# Altium footprint library LimeMicroAltiumLib.PcbLib: 876 footprints (part 55 of 57)
Each footprint in its own frame and in the unit in brackets; x right, y up, seen from the top. Pads: shape width x height; smd on the part's side, far side on the other; paste and mask are expansions set on the pad; w line width, h text height; cw(c..) or ccw(c..) is an arc to the next point about the centre after c.
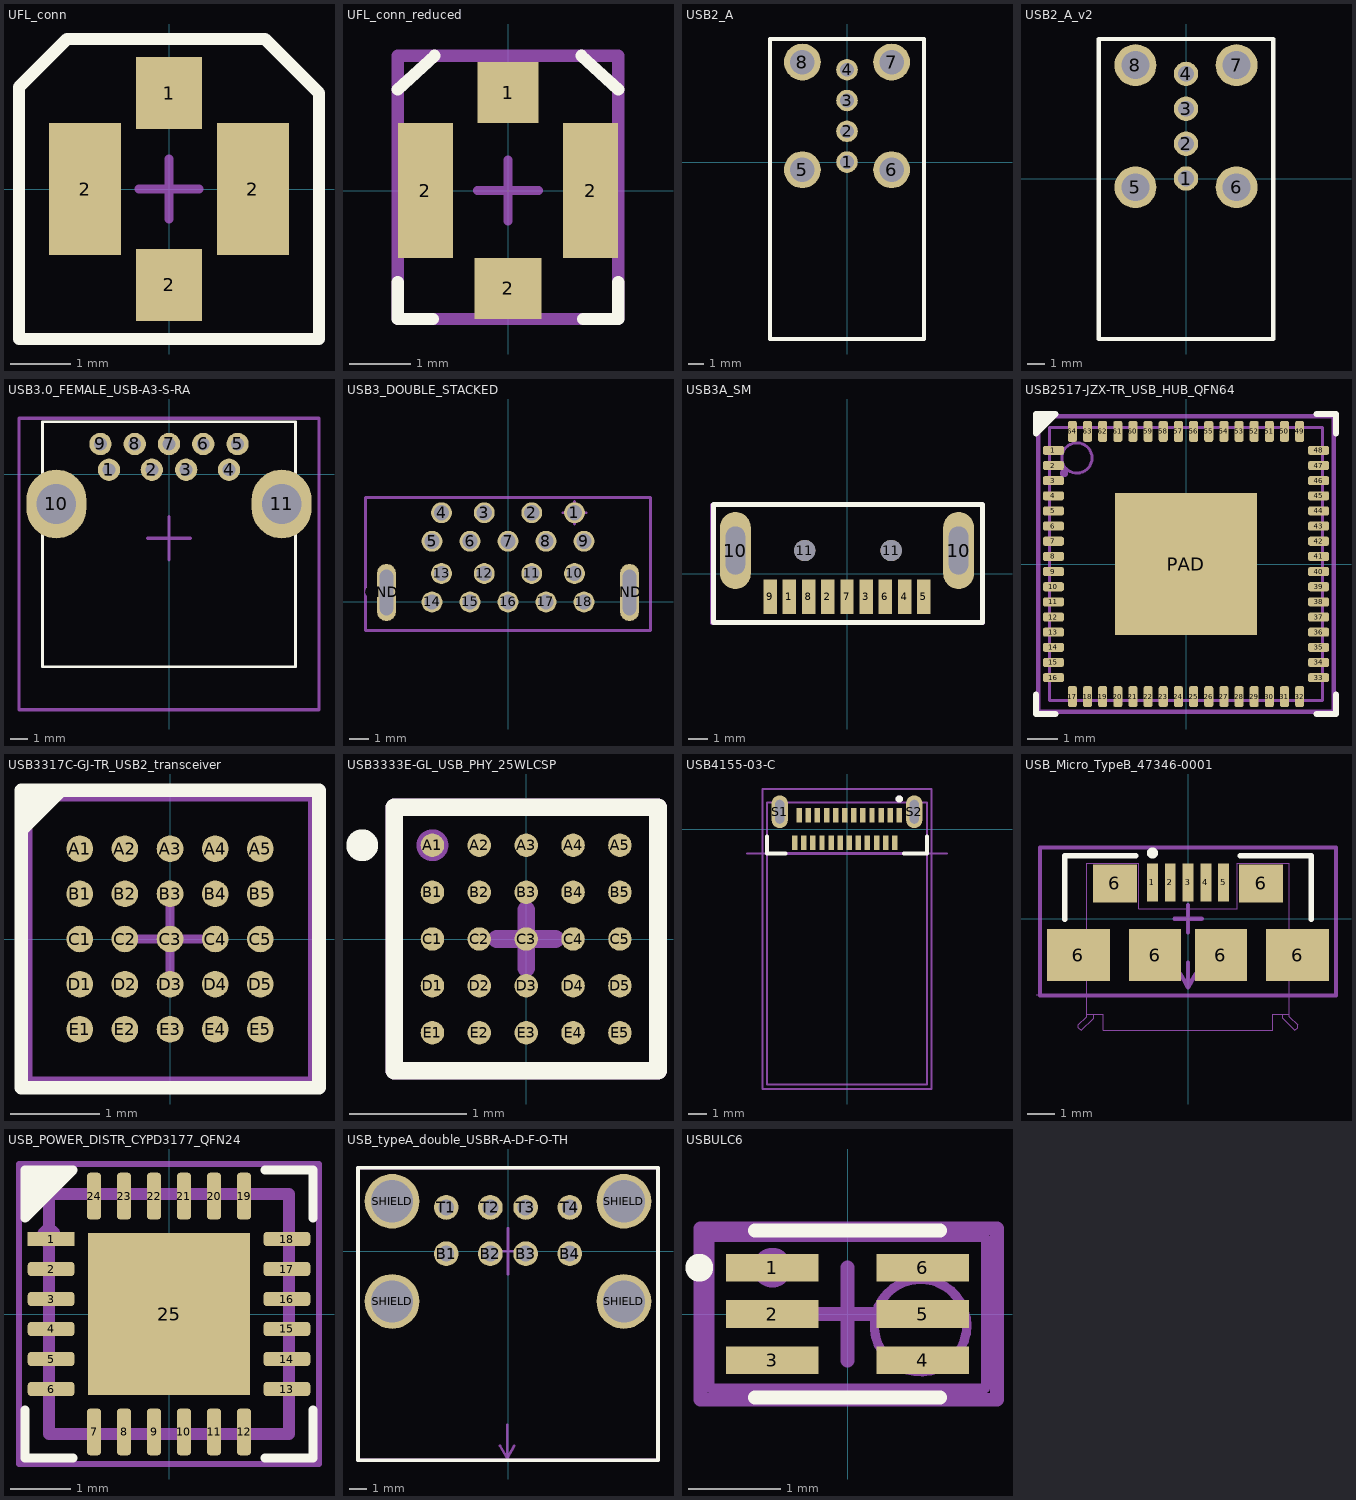
[diagram p54: the footprints below, top view; thin cyan lines are the x and y axes]

## UFL_conn [mm]
pads (4):
  rect 1.1x1.2 smd: 1(0,1.6) 2(0,-1.6)
  rect 1.2x2.2 smd: 2(-1.4,0) 2(1.4,0)
Top Overlay:
  lines w0.2: -2.5,-2.5 -2.5,1.7 -1.7,2.5 1.6,2.5 2.5,1.6 2.5,-2.5 -2.5,-2.5
Top Solder:
  region: -0.55,0.9 -0.8,0.9 -0.8,1.2 -0.55,1.2
  region: 0.8,0.9 0.55,0.9 0.55,1.2 0.8,1.2
  region: 0.8,-1.2 0.55,-1.2 0.55,-0.9 0.8,-0.9
  region: -0.55,-1.2 -0.8,-1.2 -0.8,-0.9 -0.55,-0.9
Mechanical 15:
  lines w0.15: -0.5,0 0.5,0 ; 0,-0.5 0,0.5 ; -2.5,-2.5 2.5,-2.5 2.5,1.6 1.6,2.5 -1.7,2.5 -2.5,1.7 -2.5,-2.5
  text "in" at -0.7,1.3 h0.55
  text ".designator" at 0,0 h0.55
  text "GND" at -1.3,-0.5 h0.3
  text "GND" at -0.35,-1.675 h0.3
  text "GND" at 1.6,-0.5 h0.3
3D body "User Library-U_FL-R-SMT-1.step": height 1.25, standoff -0.01, extent -1.5,-1.55 1.5,1.55

## UFL_conn_reduced [mm]
pads (4):
  rect 1x1 smd: 1(0,1.6)
  rect 0.9x2.2 smd: 2(-1.35,0) 2(1.35,0)
  rect 1.1x1 smd: 2(0,-1.6)
Top Overlay:
  lines w0.2: -1.8,-1.5 -1.8,-2.1 -1.225,-2.1 ; -1.8,1.65 -1.2,2.2 ; 1.2,2.2 1.8,1.65 ; 1.225,-2.1 1.8,-2.1 1.8,-1.5
Mechanical 15:
  lines w0.15: -0.5,0 0.5,0 ; 0,-0.5 0,0.5
  lines w0.2: -1.8,-2.1 -1.8,2.2 1.8,2.2 1.8,-2.1 -1.8,-2.1
  text "in" at -0.5,1.25 h0.55
  text ".designator" at 0,0 h0.55
  text "GND" at -1.3,-0.5 h0.3
  text "GND" at -0.35,-1.675 h0.3
  text "GND" at 1.6,-0.5 h0.3
3D body "User Library-U_FL-R-SMT-1.step": height 1.25, standoff -0.01, extent -1.5,-1.55 1.5,1.55

## USB2_A [mm]
pads (8):
  round 1.4 hole 0.9: 1(0,0) 2(0,2) 3(0,4) 4(0,6)
  round 2.4 hole 1.6: 5(-2.9,-0.5) 6(2.9,-0.5) 7(2.9,6.5) 8(-2.9,6.5)
Top Overlay:
  lines w0.254: -5,-11.5 5,-11.5 5,8 -5,8 -5,-11.5
Mechanical 15:
  lines w0.15: -5,-11.5 5,-11.5 5,8 -5,8 -5,-11.5
  text ".Designator" at 0,0 h0.55
3D body "614004134726.stp": height 15.1, standoff -3.2, extent -3.525,-12.245 3.575,7.055

## USB2_A_v2 [mm]
pads (8):
  round 1.4 hole 0.9: 1(0,0) 2(0,2) 3(0,4) 4(0,6)
  round 2.4 hole 1.6: 5(-2.9,-0.5) 6(2.9,-0.5) 7(2.9,6.5) 8(-2.9,6.5)
Top Overlay:
  lines w0.254: -5,-9.2 -5,8 5,8 5,-9.2 -5,-9.2
Mechanical 15:
  lines w0.15: -5,-9.2 5,-9.2 5,8 -5,8 -5,-9.2
  text ".Designator" at 0,0 h0.55
3D body "614004134726.stp": height 15.1, standoff -3.2, extent -3.525,-12.245 3.575,7.055

## USB3.0_FEMALE_USB-A3-S-RA [mm]
pads (11):
  round 1.3 hole 0.75 mask+0.07: 1(-3.5,0.25) 2(-1,0.25) 3(1,0.25) 4(3.5,0.25) 5(4,1.75) 6(2,1.75) 7(0,1.75) 8(-2,1.75) 9(-4,1.75)
  oval 3.5x4 hole 2.311 mask+0.1: 10(-6.57,-1.75) 11(6.57,-1.75)
Top Overlay:
  lines w0.152: -7.379,-3.293 -7.379,-11.25 7.379,-11.25 7.379,-3.293 ; -7.379,-0.207 -7.379,3.047 7.379,3.047 7.379,-0.207
Mechanical 15:
  lines w0.2: -1.25,-3.75 0,-3.75 ; 0,-5 0,-3.75 ; 0,-2.5 0,-3.75 ; 1.25,-3.75 0,-3.75 ; -8.75,-13.75 -8.75,3.25 8.75,3.25 8.75,-13.75 -8.75,-13.75
  text "TX+" at -4.5,2.5 h0.4
  text "TX-" at -2.75,2.5 h0.4
  text "GND" at -0.5,2.5 h0.4
  text "RX+" at 1.5,2.5 h0.4
  text "RX-" at 3.75,2.5 h0.4
  text "GND" at 3,-0.75 h0.4
  text "D-" at -1.25,-0.75 h0.4
  text "D+" at 0.75,-0.75 h0.4
  text "VBUS" at -4.25,-0.75 h0.4
  text ".Designator" at 0,-3.75 h0.55
  text "1" at -3.5,0 h0.55
  text "2" at -1.25,0 h0.55
  text "3" at 0.75,0 h0.55
  text "4" at 3.25,0 h0.55
  text "5" at 3.75,1.5 h0.55
  text "6" at 1.75,1.5 h0.55
  text "7" at -0.25,1.5 h0.55
  text "8" at -2.25,1.5 h0.55
  text "9" at -4.25,1.5 h0.55
3D body "usb-a3-s-ra-model.step": height 7.71, standoff -3.21, extent -7.8,-13.53 7.8,2.92

## USB3_DOUBLE_STACKED [mm]
pads (20):
  round 1.1 hole 0.8 mask+0.05: 1(3.5,4.7) 2(1.25,4.7) 3(-1.25,4.7) 4(-3.5,4.7) 5(-4,3.2) 6(-2,3.2) 7(0,3.2) 8(2,3.2) 9(4,3.2) 10(3.5,1.5) 11(1.25,1.5) 12(-1.25,1.5) 13(-3.5,1.5) 14(-4,0) 15(-2,0) 16(0,0) 17(2,0) 18(4,0)
  oval 1x3 hole 0.7 slot 2.4 at 90 deg mask+0.05: GND1(-6.4,0.5) GND2(6.4,0.5)
Mechanical 15:
  lines w0.15: 2.9,4.7 3.5,4.7 ; 3.5,4.1 3.5,4.7 ; 3.5,5.3 3.5,4.7 ; 4.1,4.7 3.5,4.7 ; -7.5,-1.5 -7.5,5.5 7.5,5.5 7.5,-1.5 -7.5,-1.5
  text ".Designator" at 0,0 h0.7

## USB3A_SM [mm]
pads (13):
  rect 0.7x1.8 smd: 1(-3,-1.2) 2(-1,-1.2) 3(1,-1.2) 4(3,-1.2) 5(4,-1.2) 6(2,-1.2) 7(0,-1.2) 8(-2,-1.2) 9(-4,-1.2)
  oval 1.6x4 hole 1 slot 2.5 at 90 deg: 10(-5.8,1.2) 10(5.8,1.2)
  round 1.1 hole 1.1 unplated: 11(-2.2,1.2) 11(2.3,1.2)
Top Overlay:
  lines w0.254: -6.95,-2.55 7.05,-2.55 7.05,3.6 -6.95,3.6 -6.95,-2.55
Mechanical 15:
  lines w0.15: -7.05,-2.6 7.1,-2.6 7.1,3.6 -7.05,3.6 -7.05,-2.6
  text ".Designator" at -0.2,0.3 h0.55
3D body "692112030100.stp": height 1.8, standoff -2.7, extent -6,-1.754 6,19

## USB2517-JZX-TR_USB_HUB_QFN64 [mm]
pads (65):
  rrect50% 0.7x0.3 smd mask+0.05: 1(-4.375,3.75) 2(-4.375,3.25) 3(-4.375,2.75) 4(-4.375,2.25) 5(-4.375,1.75) 6(-4.375,1.25) 7(-4.375,0.75) 8(-4.375,0.25) 9(-4.375,-0.25) 10(-4.375,-0.75) 11(-4.375,-1.25) 12(-4.375,-1.75) 13(-4.375,-2.25) 14(-4.375,-2.75) 15(-4.375,-3.25) 16(-4.375,-3.75) 33(4.375,-3.75) 34(4.375,-3.25) 35(4.375,-2.75) 36(4.375,-2.25) 37(4.375,-1.75) 38(4.375,-1.25) 39(4.375,-0.75) 40(4.375,-0.25) 41(4.375,0.25) 42(4.375,0.75) 43(4.375,1.25) 44(4.375,1.75) 45(4.375,2.25) 46(4.375,2.75) 47(4.375,3.25) 48(4.375,3.75)
  rrect50% 0.3x0.7 smd mask+0.05: 17(-3.75,-4.375) 18(-3.25,-4.375) 19(-2.75,-4.375) 20(-2.25,-4.375) 21(-1.75,-4.375) 22(-1.25,-4.375) 23(-0.75,-4.375) 24(-0.25,-4.375) 25(0.25,-4.375) 26(0.75,-4.375) 27(1.25,-4.375) 28(1.75,-4.375) 29(2.25,-4.375) 30(2.75,-4.375) 31(3.25,-4.375) 32(3.75,-4.375) 49(3.75,4.375) 50(3.25,4.375) 51(2.75,4.375) 52(2.25,4.375) 53(1.75,4.375) 54(1.25,4.375) 55(0.75,4.375) 56(0.25,4.375) 57(-0.25,4.375) 58(-0.75,4.375) 59(-1.25,4.375) 60(-1.75,4.375) 61(-2.25,4.375) 62(-2.75,4.375) 63(-3.25,4.375) 64(-3.75,4.375)
  rect 4.7x4.7 smd mask+0.05: PAD(0,0)
Top Overlay:
  region: -4.9,4.35
  region: -4.95,4.3 -4.95,4.95 -4.3,4.95
  lines w0.2: -4.95,-4.3 -4.95,-4.95 -4.3,-4.95 ; 4.3,-4.95 4.95,-4.95 4.95,-4.3 ; 4.3,4.95 4.95,4.95 4.95,4.3 ; -4.95,4.3 -4.95,4.95 -4.3,4.95 -4.95,4.3
Mechanical 13:
  circle w0.1: c-3.6,3.5 r0.5
  lines w0.1: -4.5,-4.5 4.5,-4.5 4.5,4.5 -4.5,4.5 -4.5,-4.5
Mechanical 15:
  circle w0.2: c-4.025,3 r0.035
  lines w0.15: -0.5,0 0.5,0 ; 0,-0.5 0,0.5 ; -4.875,-4.875 4.875,-4.875 4.875,4.875 -4.875,4.875 -4.875,-4.875
  text ".Designator" at 0,0 h0.55
3D body "User Library-QFN64-2.step": height 0.9, standoff 0, extent -4.5,-4.525 4.54,4.515

## USB3317C-GJ-TR_USB2_transceiver [mm]
pads (25):
  round 0.3 smd paste+0 mask+0.05: A1(-1.016,1.016) A2(-0.508,1.016) A3(0,1.016) A4(0.508,1.016) A5(1.016,1.016) B1(-1.016,0.508) B2(-0.508,0.508) B3(0,0.508) B4(0.508,0.508) B5(1.016,0.508) C1(-1.016,0) C2(-0.508,0) C3(0,0) C4(0.508,0) C5(1.016,0) D1(-1.016,-0.508) D2(-0.508,-0.508) D3(0,-0.508) D4(0.508,-0.508) D5(1.016,-0.508) E1(-1.016,-1.016) E2(-0.508,-1.016) E3(0,-1.016) E4(0.508,-1.016) E5(1.016,-1.016)
Top Overlay:
  region: -1.7,1.1 -1.124,1.676 -1.676,1.676
  lines w0.152: -1.676,-1.676 1.676,-1.676 1.676,1.676 -1.676,1.676 -1.676,-1.676
Mechanical 15:
  lines w0.1: -0.4,0 0,0 ; 0,-0.4 0,0 ; 0,0.4 0,0 ; 0.4,0 0,0 ; -1.6,-1.6 1.6,-1.6 1.6,1.6 -1.6,1.6 -1.6,-1.6
  text "E1" at -1.3,-1.3 h0.4
  text "E5" at 0.7,-1.3 h0.4
  text "A5" at 0.7,0.9 h0.4
  text "A1" at -1.3,0.9 h0.4
  text ".Designator" at 0,0 h0.55
3D body "VFBGA25_3X3_MCH.step": height 0.99, standoff 0, extent -1.549,-1.549 1.549,1.549

## USB3333E-GL_USB_PHY_25WLCSP [mm]
pads (25):
  round 0.2 smd paste+0 mask+0.05: A1(-0.8,0.8) A2(-0.4,0.8) A3(0,0.8) A4(0.4,0.8) A5(0.8,0.8) B1(-0.8,0.4) B2(-0.4,0.4) B3(0,0.4) B4(0.4,0.4) B5(0.8,0.4) C1(-0.8,0) C2(-0.4,0) C3(0,0) C4(0.4,0) C5(0.8,0) D1(-0.8,-0.4) D2(-0.4,-0.4) D3(0,-0.4) D4(0.4,-0.4) D5(0.8,-0.4) E1(-0.8,-0.8) E2(-0.4,-0.8) E3(0,-0.8) E4(0.4,-0.8) E5(0.8,-0.8)
Top Overlay:
  circle w0.2: c-1.4,0.8 r0.035
  lines w0.15: -1.125,-1.125 1.125,-1.125 1.125,1.125 -1.125,1.125 -1.125,-1.125
Mechanical 15:
  circle w0.2: c-0.8,0.8 r0.035
  lines w0.15: -0.25,0 0,0 ; 0,-0.25 0,0 ; 0,0.25 0,0 ; 0.25,0 0,0 ; -1.125,-1.125 -1.125,1.125 1.125,1.125 1.125,-1.125 -1.125,-1.125
  text ".Designator" at 0,0 h0.55
3D body: height 0.23, standoff -0.03, extent -0.121,-0.125 0.121,0.121
3D body: height 0.23, standoff -0.03, extent -0.121,0.675 0.121,0.921
3D body: height 0.23, standoff -0.03, extent -0.121,0.275 0.121,0.521
3D body: height 0.23, standoff -0.03, extent -0.121,-0.525 0.121,-0.279
3D body: height 0.23, standoff -0.03, extent -0.121,-0.925 0.121,-0.679
3D body: height 0.23, standoff -0.03, extent 0.679,-0.125 0.921,0.121
3D body: height 0.23, standoff -0.03, extent 0.279,-0.125 0.521,0.121
3D body: height 0.23, standoff -0.03, extent -0.521,-0.125 -0.279,0.121
3D body: height 0.23, standoff -0.03, extent -0.921,-0.125 -0.679,0.121
3D body: height 0.23, standoff -0.03, extent 0.279,0.675 0.521,0.921
3D body: height 0.23, standoff -0.03, extent 0.679,0.675 0.921,0.921
3D body: height 0.23, standoff -0.03, extent 0.679,0.275 0.921,0.521
3D body: height 0.23, standoff -0.03, extent 0.279,0.275 0.521,0.521
3D body: height 0.23, standoff -0.03, extent 0.679,-0.525 0.921,-0.279
3D body: height 0.23, standoff -0.03, extent 0.279,-0.525 0.521,-0.279
3D body: height 0.23, standoff -0.03, extent 0.679,-0.925 0.921,-0.679
3D body: height 0.23, standoff -0.03, extent 0.279,-0.925 0.521,-0.679
3D body: height 0.23, standoff -0.03, extent -0.921,0.675 -0.679,0.921
3D body: height 0.23, standoff -0.03, extent -0.521,0.675 -0.279,0.921
3D body: height 0.23, standoff -0.03, extent -0.521,0.275 -0.279,0.521
3D body: height 0.23, standoff -0.03, extent -0.921,0.275 -0.679,0.521
3D body: height 0.23, standoff -0.03, extent -0.521,-0.525 -0.279,-0.279
3D body: height 0.23, standoff -0.03, extent -0.921,-0.525 -0.679,-0.279
3D body: height 0.23, standoff -0.03, extent -0.521,-0.925 -0.279,-0.679
3D body: height 0.23, standoff -0.03, extent -0.921,-0.925 -0.679,-0.679
3D body: height 0.62, standoff 0.16, extent -1.004,-1.002 0.996,0.998

## USB4155-03-C [mm] "USB3 type C connector"
pads (26):
  rect 0.3x0.8 smd mask+0.05: A1(2.875,0.75) A2(2.375,0.75) A3(1.875,0.75) A4(1.375,0.75) A5(0.875,0.75) A6(0.375,0.75) A7(-0.125,0.75) A8(-0.625,0.75) A9(-1.125,0.75) A10(-1.625,0.75) A11(-2.125,0.75) A12(-2.625,0.75) B1(-2.875,-0.75) B2(-2.375,-0.75) B3(-1.875,-0.75) B4(-1.375,-0.75) B5(-0.875,-0.75) B6(-0.375,-0.75) B7(0.125,-0.75) B8(0.625,-0.75) B9(1.125,-0.75) B10(1.625,-0.75) B11(2.125,-0.75) B12(2.625,-0.75)
  oval 0.9x1.8 hole 0.5 slot 1.3 at 90 deg mask+0.05: S1(-3.7,0.95) S2(3.7,0.95)
Top Overlay:
  circle w0.2: c2.875,1.65 r0.1
  lines w0.2: -4.4,-0.4 -4.4,-1.35 -3.375,-1.35 ; 3.125,-1.35 4.4,-1.35 4.4,-0.4
Mechanical 13:
  circle w0.2: c2.875,1.65 r0.1
  lines w0.1: -5.5,-1.35 5.5,-1.35 ; -4.4,-14.05 -4.4,1.45 4.4,1.45 4.4,-14.05 -4.4,-14.05
  text "PCB Edge" at -3.525,-2.5 h0.81
Mechanical 15:
  lines w0.1: -4.65,-14.3 -4.65,2.2 4.65,2.2 4.65,-14.3 -4.65,-14.3
  lines w0.15: -3.725,-1.35 3.725,-1.35
  text "B12" at 2.125,-0.35 h0.4
  text "B1" at -3.175,-0.325 h0.4
  text "A1" at 2.55,1.175 h0.4
  text "A12" at -3.1,1.175 h0.4
  text "PCB Edge" at -1.95,-0.95 h0.55
  text ".Designator" at 0,0 h0.55
3D body "USB4155-03-C--3DModel-STEP-1.STEP": height 1.6, standoff -1.3, extent -4.4,-14.05 4.4,1.45

## USB_Micro_TypeB_47346-0001 [mm]
pads (11):
  rect 0.4x1.4 smd mask+0.074: 1(-1.3,1.325) 2(-0.65,1.325) 3(0,1.325) 4(0.65,1.325) 5(1.3,1.325)
  rect 2.3x1.9 smd: 6(-4,-1.325) 6(4,-1.325)
  rect 1.6x1.4 smd: 6(-2.667,1.289) 6(2.667,1.289)
  rect 1.9x1.9 smd: 6(-1.2,-1.325) 6(1.2,-1.325)
Top Overlay:
  circle w0.2: c-1.3,2.4 r0.1
  lines w0.2: -4.5,-0.025 -4.5,2.305 -1.9,2.305 ; 1.9,2.305 4.5,2.305 4.5,-0.025
Mechanical 13:
  lines w0.02: -5.55,-2.775 5.35,-2.775 ; -3.45,-3.475 -3.45,-3.625 -3.9,-4.075 -4,-3.975 -4,-3.875 -3.7,-3.575 -3.7,-3.475 ; 3.45,-3.475 3.45,-3.625 3.9,-4.075 4,-3.975 4,-3.875 3.7,-3.575 3.7,-3.475 ; -3.7,-3.475 -3.1,-3.475 -3.1,-4.075 0,-4.075 3.1,-4.075 3.1,-3.475 3.7,-3.475 ; -3.7,-3.475 -3.7,2.025 -1.8,2.025 -1.8,0.375 0,0.375 1.8,0.375 1.8,2.025 3.7,2.025 3.7,-3.475
  text "1" at -1.3,0.825 h0.5
  text "5" at 1.1,0.925 h0.5
  text "PCB Edge" at -5.25,-2.725 h0.25
Mechanical 15:
  circle w0.2: c-1.3,1.5 r0.1
  lines w0.15: -0.5,0 0,0 ; -0.289,-1.994 0,-2.5 ; 0,-1.6 0,-2.5 ; 0,-0.5 0,0 ; 0,0.5 0,0 ; 0.289,-1.994 0,-2.5 ; 0.5,0 0,0 ; -5.4,-2.8 -5.4,2.6 5.4,2.6 5.4,-2.8 -5.4,-2.8
  text "PCB edge" at -1.4,-1.4 h0.4
  text ".Designator" at 0,0 h0.55
3D body "Micro USB.step": height 2.7, standoff -0.24, extent -4,-3.715 3.98,1.715

## USB_POWER_DISTR_CYPD3177_QFN24 [mm]
pads (25):
  rect 0.781x0.239 smd paste+0 mask+0.05: 1(-1.966,1.25)
  rrect50% 0.781x0.239 smd paste+0 mask+0.05: 2(-1.966,0.75) 3(-1.966,0.25) 4(-1.966,-0.25) 5(-1.966,-0.75) 6(-1.966,-1.25) 13(1.966,-1.25) 14(1.966,-0.75) 15(1.966,-0.25) 16(1.966,0.25) 17(1.966,0.75) 18(1.966,1.25)
  rrect50% 0.239x0.781 smd paste+0 mask+0.05: 7(-1.25,-1.966) 8(-0.75,-1.966) 9(-0.25,-1.966) 10(0.25,-1.966) 11(0.75,-1.966) 12(1.25,-1.966) 19(1.25,1.966) 20(0.75,1.966) 21(0.25,1.966) 22(-0.25,1.966) 23(-0.75,1.966) 24(-1.25,1.966)
  rect 2.7x2.7 smd mask+0.05: 25(0,0)
Top Overlay:
  region: -2.4,1.6 -1.6,2.4 -2.4,2.4
  lines w0.15: -2.4,-1.6 -2.4,-2.4 -1.6,-2.4 ; 1.6,-2.4 2.4,-2.4 2.4,-1.6 ; 1.6,2.4 2.4,2.4 2.4,1.6 ; -2.4,1.6 -2.4,2.4 -1.6,2.4 -2.4,1.6
Mechanical 13:
  lines w0.2: -2,-2 -2,2 2,2 2,-2 -2,-2
Mechanical 15:
  circle w0.2: c-2,1.3 r0.1
  lines w0.1: -0.5,0 0,0 ; 0,-0.5 0,0 ; 0,0.5 0,0 ; 0.5,0 0,0 ; -2.5,-2.5 -2.5,2.5 2.5,2.5 2.5,-2.5 -2.5,-2.5
  text ".Designator" at 0,0 h0.55
3D body "IC_Cypress_Semiconductor_CYPD3177-24LQXQ_eec.STEP": height 0.25, standoff 0, extent -2.606,-2.606 2.606,2.606

## USB_typeA_double_USBR-A-D-F-O-TH [mm]
pads (12):
  round 1.4 hole 0.9 mask+0.05: B1(-3.5,-0.13) B2(-1,-0.13) B3(1,-0.13) B4(3.5,-0.13) T1(-3.5,2.49) T2(-1,2.49) T3(1,2.49) T4(3.5,2.49)
  round 3.1 hole 2.4 mask+0.05: SHIELD(-6.57,-2.84) SHIELD(-6.57,2.84) SHIELD(6.57,-2.84) SHIELD(6.57,2.84)
Top Overlay:
  lines w0.2: -8.5,-11.85 -8.5,4.75 8.5,4.75 8.5,-11.85 -8.5,-11.85
Mechanical 15:
  lines w0.15: -1.3,0 0,0 ; -0.45,-11.025 -0.05,-11.725 ; -0.05,-9.825 -0.05,-11.725 ; 0,-1.3 0,0 ; 0,1.3 0,0 ; 0.35,-11.025 -0.05,-11.725 ; 1.3,0 0,0
  lines w0.2: -8.5,-11.85 8.5,-11.85 8.5,4.75 -8.5,4.75 -8.5,-11.85
  text "B4" at 3,-0.5 h0.55
  text "B1" at -4,-0.5 h0.55
  text "T4" at 3,2 h0.55
  text "T1" at -4,2 h0.55
  text ".Designator" at -0.1,-0.3 h0.55
  text "PCB edge" at -1.85,-9.925 h0.55
3D body "USBR-A-D-F-O-TH.stp": height 16.1, standoff -4.2, extent -7.798,-13.55 7.798,4.1

## USBULC6 [mm]
height 1.2
pads (6):
  rect 1x0.3 smd mask+0.05: 1(-0.812,0.5) 2(-0.812,0) 3(-0.812,-0.5) 4(0.813,-0.5) 5(0.813,0) 6(0.813,0.5)
Top Overlay:
  circle w0.25: c-1.6,0.5 r0.025
  lines w0.15: -1,-0.9 1,-0.9 ; -1,0.9 1,0.9
Mechanical 13:
  circle w0.1: c0.788,-0.125 r0.5
  lines w0.1: -1.487,-0.8 -1.487,0.825 1.488,0.825 1.488,-0.8 -1.487,-0.8
Mechanical 15:
  circle w0.35: c-0.812,0.5 r0.038
  lines w0.15: -0.5,0 0.5,0 ; 0,-0.5 0,0.5 ; -1.587,-0.925 -1.587,0.925 1.613,0.925 1.613,-0.925 -1.587,-0.925
  text ".Designator" at 0,0 h0.55
3D body: height 1.5, standoff 0, extent -0.825,-0.5 0.825,0.5

## uSpark_BODY1_MECH [mm]
3D body "User Library-SMA Antenna.step": height 81.97, standoff -5, extent 52.5,17.65 83.4,27.65
3D body "User Library-SMA Antenna.step": height 81.97, standoff -5, extent 52.475,3.325 83.375,13.325
3D body "User Library-SMA Antenna.step": height 81.97, standoff -5, extent 52.475,-24.75 83.375,-14.75
3D body "User Library-SMA Antenna.step": height 81.97, standoff -5, extent 52.475,-10.425 83.375,-0.425
3D body "1455A1202.stp": height 4.37, standoff -7.63, extent -73.5,-33.291 52.5,36.711